# Altium footprint library Terminal_Blocks_Pluggable PCB_5.08mm.PcbLib: 299 footprints (part 12 of 19)
Each footprint in its own frame and in the unit in brackets; x right, y up, seen from the top. Pads: shape width x height; smd on the part's side, far side on the other; paste and mask are expansions set on the pad; w line width, h text height; cw(c..) or ccw(c..) is an arc to the next point about the centre after c.
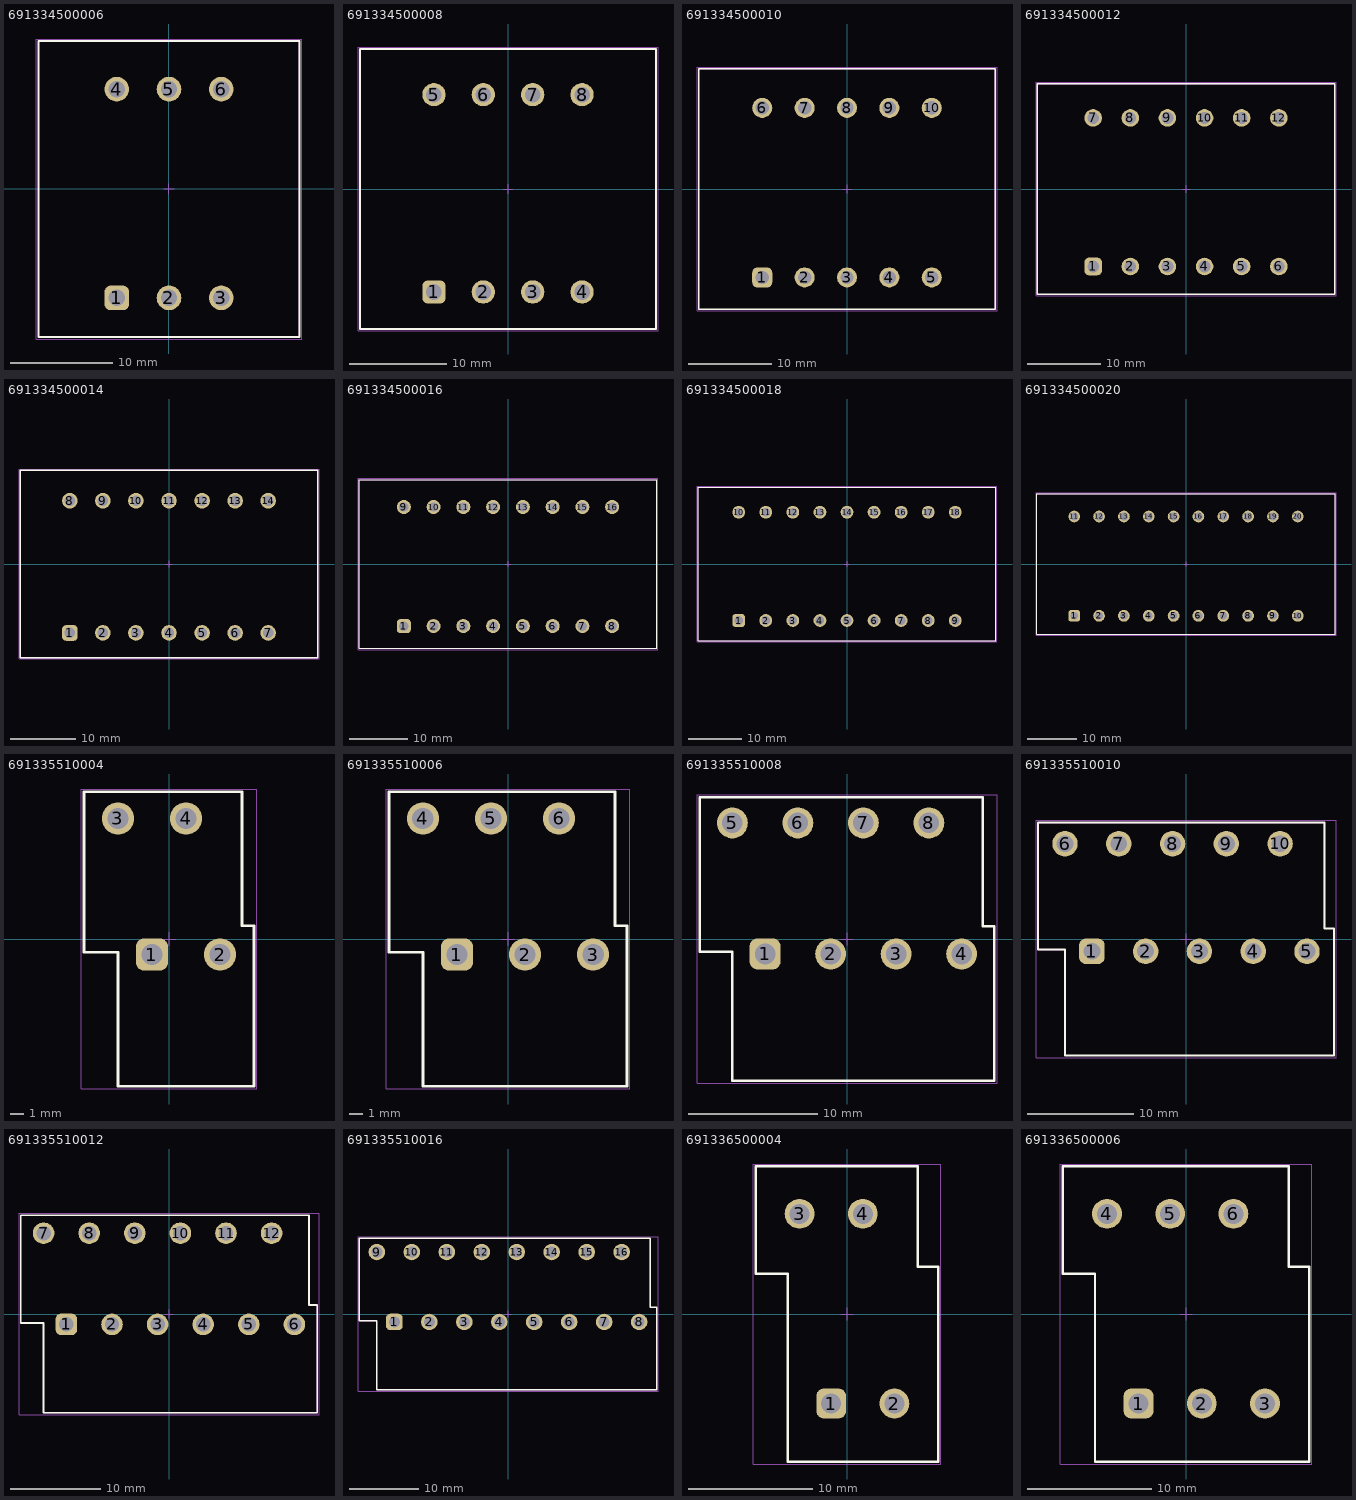
[diagram p11: the footprints below, top view; thin cyan lines are the x and y axes]

## 691334500006 [mm] "5,08mm - PCB - Dual row - Vertical - Flanges - 06p"
height 22
pads (6):
  rrect50% 2.4x2.4 hole 1.6: 1(-5.08,-10.6)
  round 2.4 hole 1.6: 2(0,-10.6) 3(5.08,-10.6) 4(-5.08,9.72) 5(0,9.72) 6(5.08,9.72)
Top Overlay:
  lines w0.2: -12.7,-14.4 12.7,-14.4 12.7,14.4 -12.7,14.4 -12.7,-14.4
Top Designator:
  text ".Designator" at -7.498,-0.5 h1.5
Top Component Outline:
  lines w0.1: -12.7,-14.4 -12.7,14.4 12.7,14.4 12.7,-14.4 -12.7,-14.4
Top 3D Body:
  lines w0.1: -12.7,-14.4 12.7,-14.4 12.7,14.4 -12.7,14.4 -12.7,-14.4
Top Courtyard:
  lines w0.05: -12.9,-14.6 -12.9,14.6 12.9,14.6 12.9,-14.6 -12.9,-14.6
Top Component Center:
  lines w0.05: -0.5,0 0.5,0 ; 0,-0.5 0,0.5
3D body "691334500006.stp": height 22.05, standoff -3.85, extent -12.7,-14.4 12.7,14.4

## 691334500008 [mm] "5,08mm - PCB - Dual row - Vertical - Flanges - 08p"
height 22
pads (8):
  rrect50% 2.4x2.4 hole 1.6: 1(-7.62,-10.6)
  round 2.4 hole 1.6: 2(-2.54,-10.6) 3(2.54,-10.6) 4(7.62,-10.6) 5(-7.62,9.72) 6(-2.54,9.72) 7(2.54,9.72) 8(7.62,9.72)
Top Overlay:
  lines w0.2: -15.24,-14.4 15.24,-14.4 15.24,14.4 -15.24,14.4 -15.24,-14.4
Top Designator:
  text ".Designator" at -7.498,-0.5 h1.5
Top Component Outline:
  lines w0.1: -15.24,-14.4 -15.24,14.4 15.24,14.4 15.24,-14.4 -15.24,-14.4
Top 3D Body:
  lines w0.1: -15.24,-14.4 15.24,-14.4 15.24,14.4 -15.24,14.4 -15.24,-14.4
Top Courtyard:
  lines w0.05: -15.44,-14.6 -15.44,14.6 15.44,14.6 15.44,-14.6 -15.44,-14.6
Top Component Center:
  lines w0.05: -0.5,0 0.5,0 ; 0,-0.5 0,0.5
3D body "691334500008.stp": height 22.05, standoff -3.85, extent -15.24,-14.4 15.24,14.4

## 691334500010 [mm] "5,08mm - PCB - Dual row - Vertical - Flanges - 10p"
height 22
pads (10):
  rrect50% 2.4x2.4 hole 1.6: 1(-10.16,-10.6)
  round 2.4 hole 1.6: 2(-5.08,-10.6) 3(0,-10.6) 4(5.08,-10.6) 5(10.16,-10.6) 6(-10.16,9.72) 7(-5.08,9.72) 8(0,9.72) 9(5.08,9.72) 10(10.16,9.72)
Top Overlay:
  lines w0.2: -17.78,-14.4 17.78,-14.4 17.78,14.4 -17.78,14.4 -17.78,-14.4
Top Designator:
  text ".Designator" at -7.498,-0.5 h1.5
Top Component Outline:
  lines w0.1: -17.78,-14.4 -17.78,14.4 17.78,14.4 17.78,-14.4 -17.78,-14.4
Top 3D Body:
  lines w0.1: -17.78,-14.4 17.78,-14.4 17.78,14.4 -17.78,14.4 -17.78,-14.4
Top Courtyard:
  lines w0.05: -17.98,-14.6 -17.98,14.6 17.98,14.6 17.98,-14.6 -17.98,-14.6
Top Component Center:
  lines w0.05: -0.5,0 0.5,0 ; 0,-0.5 0,0.5
3D body "691334500010.stp": height 22.05, standoff -3.85, extent -17.78,-14.4 17.78,14.4

## 691334500012 [mm] "5,08mm - PCB - Dual row - Vertical - Flanges - 12p"
height 22
pads (12):
  rrect50% 2.4x2.4 hole 1.6: 1(-12.7,-10.6)
  round 2.4 hole 1.6: 2(-7.62,-10.6) 3(-2.54,-10.6) 4(2.54,-10.6) 5(7.62,-10.6) 6(12.7,-10.6) 7(-12.7,9.72) 8(-7.62,9.72) 9(-2.54,9.72) 10(2.54,9.72) 11(7.62,9.72) 12(12.7,9.72)
Top Overlay:
  lines w0.2: -20.32,-14.4 -20.32,14.4 20.32,14.4 20.32,-14.4 -20.32,-14.4
Top Designator:
  text ".Designator" at -7.498,-0.5 h1.5
Top Component Outline:
  lines w0.1: -20.32,-14.4 20.32,-14.4 20.32,14.4 -20.32,14.4 -20.32,-14.4
Top 3D Body:
  lines w0.1: -20.32,-14.4 -20.32,14.4 20.32,14.4 20.32,-14.4 -20.32,-14.4
Top Courtyard:
  lines w0.05: -20.52,-14.6 20.52,-14.6 20.52,14.6 -20.52,14.6 -20.52,-14.6
Top Component Center:
  lines w0.05: -0.5,0 0.5,0 ; 0,-0.5 0,0.5
3D body "691334500012.stp": height 22.05, standoff -3.85, extent -20.32,-14.4 20.32,14.4

## 691334500014 [mm] "5,08mm - PCB - Dual row - Vertical - Flanges - 14p"
height 22
pads (14):
  rrect50% 2.4x2.4 hole 1.6: 1(-15.24,-10.6)
  round 2.4 hole 1.6: 2(-10.16,-10.6) 3(-5.08,-10.6) 4(0,-10.6) 5(5.08,-10.6) 6(10.16,-10.6) 7(15.24,-10.6) 8(-15.24,9.72) 9(-10.16,9.72) 10(-5.08,9.72) 11(0,9.72) 12(5.08,9.72) 13(10.16,9.72) 14(15.24,9.72)
Top Overlay:
  lines w0.2: -22.86,-14.4 22.86,-14.4 22.86,14.4 -22.86,14.4 -22.86,-14.4
Top Designator:
  text ".Designator" at -7.498,-0.5 h1.5
Top Component Outline:
  lines w0.1: -22.86,-14.4 -22.86,14.4 22.86,14.4 22.86,-14.4 -22.86,-14.4
Top 3D Body:
  lines w0.1: -22.86,-14.4 22.86,-14.4 22.86,14.4 -22.86,14.4 -22.86,-14.4
Top Courtyard:
  lines w0.05: -23.06,-14.6 -23.06,14.6 23.06,14.6 23.06,-14.6 -23.06,-14.6
Top Component Center:
  lines w0.05: -0.5,0 0.5,0 ; 0,-0.5 0,0.5
3D body "691334500014.stp": height 22.05, standoff -3.85, extent -22.86,-14.4 22.86,14.4

## 691334500016 [mm] "5,08mm - PCB - Dual row - Vertical - Flanges - 16p"
height 22
pads (16):
  rrect50% 2.4x2.4 hole 1.6: 1(-17.78,-10.6)
  round 2.4 hole 1.6: 2(-12.7,-10.6) 3(-7.62,-10.6) 4(-2.54,-10.6) 5(2.54,-10.6) 6(7.62,-10.6) 7(12.7,-10.6) 8(17.78,-10.6) 9(-17.78,9.72) 10(-12.7,9.72) 11(-7.62,9.72) 12(-2.54,9.72) 13(2.54,9.72) 14(7.62,9.72) 15(12.7,9.72) 16(17.78,9.72)
Top Overlay:
  lines w0.2: -25.4,-14.4 -25.4,14.4 25.4,14.4 25.4,-14.4 -25.4,-14.4
Top Designator:
  text ".Designator" at -7.498,-0.5 h1.5
Top Component Outline:
  lines w0.1: -25.4,-14.4 25.4,-14.4 25.4,14.4 -25.4,14.4 -25.4,-14.4
Top 3D Body:
  lines w0.1: -25.4,-14.4 -25.4,14.4 25.4,14.4 25.4,-14.4 -25.4,-14.4
Top Courtyard:
  lines w0.05: -25.6,-14.6 25.6,-14.6 25.6,14.6 -25.6,14.6 -25.6,-14.6
Top Component Center:
  lines w0.05: -0.5,0 0.5,0 ; 0,-0.5 0,0.5
3D body "691334500016.stp": height 22.05, standoff -3.85, extent -25.4,-14.4 25.4,14.4

## 691334500018 [mm] "5,08mm - PCB - Dual row - Vertical - Flanges - 18p"
height 22
pads (18):
  rrect50% 2.4x2.4 hole 1.6: 1(-20.32,-10.6)
  round 2.4 hole 1.6: 2(-15.24,-10.6) 3(-10.16,-10.6) 4(-5.08,-10.6) 5(0,-10.6) 6(5.08,-10.6) 7(10.16,-10.6) 8(15.24,-10.6) 9(20.32,-10.6) 10(-20.32,9.72) 11(-15.24,9.72) 12(-10.16,9.72) 13(-5.08,9.72) 14(0,9.72) 15(5.08,9.72) 16(10.16,9.72) 17(15.24,9.72) 18(20.32,9.72)
Top Overlay:
  lines w0.2: -27.94,-14.4 -27.94,14.4 27.94,14.4 27.94,-14.4 -27.94,-14.4
Top Designator:
  text ".Designator" at -7.498,-0.5 h1.5
Top Component Outline:
  lines w0.1: -27.94,-14.4 27.94,-14.4 27.94,14.4 -27.94,14.4 -27.94,-14.4
Top 3D Body:
  lines w0.1: -27.94,-14.4 -27.94,14.4 27.94,14.4 27.94,-14.4 -27.94,-14.4
Top Courtyard:
  lines w0.05: -28.14,-14.6 28.14,-14.6 28.14,14.6 -28.14,14.6 -28.14,-14.6
Top Component Center:
  lines w0.05: -0.5,0 0.5,0 ; 0,-0.5 0,0.5
3D body "691334500018.stp": height 22.05, standoff -3.85, extent -27.94,-14.4 27.94,14.4

## 691334500020 [mm] "5,08mm - PCB - Dual row - Vertical - Flanges - 20p"
height 22
pads (20):
  rrect50% 2.4x2.4 hole 1.6: 1(-22.86,-10.6)
  round 2.4 hole 1.6: 2(-17.78,-10.6) 3(-12.7,-10.6) 4(-7.62,-10.6) 5(-2.54,-10.6) 6(2.54,-10.6) 7(7.62,-10.6) 8(12.7,-10.6) 9(17.78,-10.6) 10(22.86,-10.6) 11(-22.86,9.72) 12(-17.78,9.72) 13(-12.7,9.72) 14(-7.62,9.72) 15(-2.54,9.72) 16(2.54,9.72) 17(7.62,9.72) 18(12.7,9.72) 19(17.78,9.72) 20(22.86,9.72)
Top Overlay:
  lines w0.2: -30.48,-14.4 30.48,-14.4 30.48,14.4 -30.48,14.4 -30.48,-14.4
Top Designator:
  text ".Designator" at -7.498,-0.5 h1.5
Top Component Outline:
  lines w0.1: -30.48,-14.4 -30.48,14.4 30.48,14.4 30.48,-14.4 -30.48,-14.4
Top 3D Body:
  lines w0.1: -30.48,-14.4 30.48,-14.4 30.48,14.4 -30.48,14.4 -30.48,-14.4
Top Courtyard:
  lines w0.05: -30.68,-14.6 -30.68,14.6 30.68,14.6 30.68,-14.6 -30.68,-14.6
Top Component Center:
  lines w0.05: -0.5,0 0.5,0 ; 0,-0.5 0,0.5
3D body "691334500020.stp": height 22.05, standoff -3.85, extent -30.48,-14.4 30.48,14.4

## 691335510004 [mm] "Double Level Modular Horizontal Male PCB Header, pitch 5.08mm, 04p"
height 23.7
pads (4):
  rrect50% 2.4x2.4 hole 1.6: 1(-1.27,-1.16)
  round 2.4 hole 1.6: 2(3.81,-1.16) 3(-3.81,9) 4(1.27,9)
Top Overlay:
  lines w0.2: -6.35,-1 -6.35,11 5.45,11 5.45,1 6.35,1 6.35,-11 -3.81,-11 -3.81,-1 -6.35,-1
Top Designator:
  text ".Designator" at -7.498,-0.5 h1.5
Top Component Outline:
  lines w0.1: -6.35,-1 -3.81,-1 -3.81,-11 6.35,-11 6.35,1 5.45,1 5.45,11 -6.35,11 -6.35,-1
Top 3D Body:
  lines w0.1: -6.35,-1 -6.35,11 5.45,11 5.45,1 6.35,1 6.35,-11 -3.81,-11 -3.81,-1 -6.35,-1
Top Courtyard:
  lines w0.05: -6.55,-11.2 -6.55,11.2 6.55,11.2 6.55,-11.2 -6.55,-11.2
Top Component Center:
  lines w0.05: -0.5,0 0.5,0 ; 0,-0.5 0,0.5
3D body "691335510004.stp": height 23.8, standoff -3.9, extent -6.35,-11 6.35,11

## 691335510006 [mm] "Double Level Modular Horizontal Male PCB Header, pitch 5.08mm, 06p"
height 23.7
pads (6):
  rrect50% 2.4x2.4 hole 1.6: 1(-3.81,-1.16)
  round 2.4 hole 1.6: 2(1.27,-1.16) 3(6.35,-1.16) 4(-6.35,9) 5(-1.27,9) 6(3.81,9)
Top Overlay:
  lines w0.2: -8.89,-1 -8.89,11 7.99,11 7.99,1 8.89,1 8.89,-11 -6.35,-11 -6.35,-1 -8.89,-1
Top Designator:
  text ".Designator" at -7.498,-0.5 h1.5
Top Component Outline:
  lines w0.1: -8.89,-1 -6.35,-1 -6.35,-11 8.89,-11 8.89,1 7.99,1 7.99,11 -8.89,11 -8.89,-1
Top 3D Body:
  lines w0.1: -8.89,-1 -8.89,11 7.99,11 7.99,1 8.89,1 8.89,-11 -6.35,-11 -6.35,-1 -8.89,-1
Top Courtyard:
  lines w0.05: -9.09,-11.2 -9.09,11.2 9.09,11.2 9.09,-11.2 -9.09,-11.2
Top Component Center:
  lines w0.05: -0.5,0 0.5,0 ; 0,-0.5 0,0.5
3D body "691335510006.stp": height 23.8, standoff -3.9, extent -8.89,-11 8.89,11

## 691335510008 [mm] "Double Level Modular Horizontal Male PCB Header, pitch 5.08mm, 08p"
height 23.7
pads (8):
  rrect50% 2.4x2.4 hole 1.6: 1(-6.35,-1.16)
  round 2.4 hole 1.6: 2(-1.27,-1.16) 3(3.81,-1.16) 4(8.89,-1.16) 5(-8.89,9) 6(-3.81,9) 7(1.27,9) 8(6.35,9)
Top Overlay:
  lines w0.2: -11.43,-1 -8.89,-1 -8.89,-11 11.43,-11 11.43,1 10.53,1 10.53,11 -11.43,11 -11.43,-1
Top Designator:
  text ".Designator" at -7.498,-0.5 h1.5
Top Component Outline:
  lines w0.1: -11.43,-1 -11.43,11 10.53,11 10.53,1 11.43,1 11.43,-11 -8.89,-11 -8.89,-1 -11.43,-1
Top 3D Body:
  lines w0.1: -11.43,-1 -8.89,-1 -8.89,-11 11.43,-11 11.43,1 10.53,1 10.53,11 -11.43,11 -11.43,-1
Top Courtyard:
  lines w0.05: -11.63,-11.2 11.63,-11.2 11.63,11.2 -11.63,11.2 -11.63,-11.2
Top Component Center:
  lines w0.05: -0.5,0 0.5,0 ; 0,-0.5 0,0.5
3D body "691335510008.stp": height 23.8, standoff -3.9, extent -11.43,-11 11.43,11

## 691335510010 [mm] "Double Level Modular Horizontal Male PCB Header, pitch 5.08mm, 10p"
height 23.7
pads (10):
  rrect50% 2.4x2.4 hole 1.6: 1(-8.89,-1.16)
  round 2.4 hole 1.6: 2(-3.81,-1.16) 3(1.27,-1.16) 4(6.35,-1.16) 5(11.43,-1.16) 6(-11.43,9) 7(-6.35,9) 8(-1.27,9) 9(3.81,9) 10(8.89,9)
Top Overlay:
  lines w0.2: -13.97,-1 -11.43,-1 -11.43,-11 13.97,-11 13.97,1 13.07,1 13.07,11 -13.97,11 -13.97,-1
Top Designator:
  text ".Designator" at -7.498,-0.5 h1.5
Top Component Outline:
  lines w0.1: -13.97,-1 -13.97,11 13.07,11 13.07,1 13.97,1 13.97,-11 -11.43,-11 -11.43,-1 -13.97,-1
Top 3D Body:
  lines w0.1: -13.97,-1 -11.43,-1 -11.43,-11 13.97,-11 13.97,1 13.07,1 13.07,11 -13.97,11 -13.97,-1
Top Courtyard:
  lines w0.05: -14.17,-11.2 14.17,-11.2 14.17,11.2 -14.17,11.2 -14.17,-11.2
Top Component Center:
  lines w0.05: -0.5,0 0.5,0 ; 0,-0.5 0,0.5
3D body "691335510010.stp": height 23.8, standoff -3.9, extent -13.97,-11 13.97,11

## 691335510012 [mm] "Double Level Modular Horizontal Male PCB Header, pitch 5.08mm, 12p"
height 23.7
pads (12):
  rrect50% 2.4x2.4 hole 1.6: 1(-11.43,-1.16)
  round 2.4 hole 1.6: 2(-6.35,-1.16) 3(-1.27,-1.16) 4(3.81,-1.16) 5(8.89,-1.16) 6(13.97,-1.16) 7(-13.97,9) 8(-8.89,9) 9(-3.81,9) 10(1.27,9) 11(6.35,9) 12(11.43,9)
Top Overlay:
  lines w0.2: -16.51,-1 -13.97,-1 -13.97,-11 16.51,-11 16.51,1 15.61,1 15.61,11 -16.51,11 -16.51,-1
Top Designator:
  text ".Designator" at -7.498,-0.5 h1.5
Top Component Outline:
  lines w0.1: -16.51,-1 -16.51,11 15.61,11 15.61,1 16.51,1 16.51,-11 -13.97,-11 -13.97,-1 -16.51,-1
Top 3D Body:
  lines w0.1: -16.51,-1 -13.97,-1 -13.97,-11 16.51,-11 16.51,1 15.61,1 15.61,11 -16.51,11 -16.51,-1
Top Courtyard:
  lines w0.05: -16.71,-11.2 16.71,-11.2 16.71,11.2 -16.71,11.2 -16.71,-11.2
Top Component Center:
  lines w0.05: -0.5,0 0.5,0 ; 0,-0.5 0,0.5
3D body "691335510012.stp": height 23.8, standoff -3.9, extent -16.51,-11 16.51,11

## 691335510016 [mm] "Double Level Modular Horizontal Male PCB Header, pitch 5.08mm, 16p"
height 23.7
pads (16):
  rrect50% 2.4x2.4 hole 1.6: 1(-16.51,-1.16)
  round 2.4 hole 1.6: 2(-11.43,-1.16) 3(-6.35,-1.16) 4(-1.27,-1.16) 5(3.81,-1.16) 6(8.89,-1.16) 7(13.97,-1.16) 8(19.05,-1.16) 9(-19.05,9) 10(-13.97,9) 11(-8.89,9) 12(-3.81,9) 13(1.27,9) 14(6.35,9) 15(11.43,9) 16(16.51,9)
Top Overlay:
  lines w0.2: -21.59,-1 -19.05,-1 -19.05,-11 21.59,-11 21.59,1 20.69,1 20.69,11 -21.59,11 -21.59,-1
Top Designator:
  text ".Designator" at -7.498,-0.5 h1.5
Top Component Outline:
  lines w0.1: -21.59,-1 -21.59,11 20.69,11 20.69,1 21.59,1 21.59,-11 -19.05,-11 -19.05,-1 -21.59,-1
Top 3D Body:
  lines w0.1: -21.59,-1 -19.05,-1 -19.05,-11 21.59,-11 21.59,1 20.69,1 20.69,11 -21.59,11 -21.59,-1
Top Courtyard:
  lines w0.05: -21.79,-11.2 21.79,-11.2 21.79,11.2 -21.79,11.2 -21.79,-11.2
Top Component Center:
  lines w0.05: -0.5,0 0.5,0 ; 0,-0.5 0,0.5
3D body "691335510016.stp": height 23.8, standoff -3.9, extent -21.59,-11 21.59,11

## 691336500004 [mm] "Double Level Vertical Header with Flanges, pitch 5.08mm, 04p"
height 22
pads (4):
  rrect50% 2.4x2.4 hole 1.6: 1(-1.27,-7.19)
  round 2.4 hole 1.6: 2(3.81,-7.19) 3(-3.81,8.05) 4(1.27,8.05)
Top Overlay:
  lines w0.2: -7.35,3.25 -4.77,3.25 -4.77,-11.85 7.35,-11.85 7.35,3.8 5.7,3.8 5.7,11.85 -7.35,11.85 -7.35,3.25
Top Designator:
  text ".Designator" at -7.498,-0.5 h1.5
Top Component Outline:
  lines w0.1: -7.35,3.25 -7.35,11.85 5.7,11.85 5.7,3.8 7.35,3.8 7.35,-11.85 -4.77,-11.85 -4.77,3.25 -7.35,3.25
Top 3D Body:
  lines w0.1: -7.35,3.25 -4.77,3.25 -4.77,-11.85 7.35,-11.85 7.35,3.8 5.7,3.8 5.7,11.85 -7.35,11.85 -7.35,3.25
Top Courtyard:
  lines w0.05: -7.55,-12.05 -7.55,12.05 7.55,12.05 7.55,-12.05 -7.55,-12.05
Top Component Center:
  lines w0.05: -0.5,0 0.5,0 ; 0,-0.5 0,0.5
3D body "691336500004.stp": height 22.06, standoff -3.84, extent -7.35,-11.85 7.35,11.85

## 691336500006 [mm] "Double Level Vertical Header with Flanges, pitch 5.08mm, 06p"
height 22
pads (6):
  rrect50% 2.4x2.4 hole 1.6: 1(-3.81,-7.19)
  round 2.4 hole 1.6: 2(1.27,-7.19) 3(6.35,-7.19) 4(-6.35,8.05) 5(-1.27,8.05) 6(3.81,8.05)
Top Overlay:
  lines w0.2: -9.89,3.25 -7.31,3.25 -7.31,-11.85 9.89,-11.85 9.89,3.8 8.24,3.8 8.24,11.85 -9.89,11.85 -9.89,3.25
Top Designator:
  text ".Designator" at -7.498,-0.5 h1.5
Top Component Outline:
  lines w0.1: -9.89,3.25 -9.89,11.85 8.24,11.85 8.24,3.8 9.89,3.8 9.89,-11.85 -7.31,-11.85 -7.31,3.25 -9.89,3.25
Top 3D Body:
  lines w0.1: -9.89,3.25 -7.31,3.25 -7.31,-11.85 9.89,-11.85 9.89,3.8 8.24,3.8 8.24,11.85 -9.89,11.85 -9.89,3.25
Top Courtyard:
  lines w0.05: -10.09,-12.05 -10.09,12.05 10.09,12.05 10.09,-12.05 -10.09,-12.05
Top Component Center:
  lines w0.05: -0.5,0 0.5,0 ; 0,-0.5 0,0.5
3D body "691336500006.stp": height 22.06, standoff -3.84, extent -9.89,-11.85 9.89,11.85